# Altium footprint library MIE1W0505BGLVH3RP.PcbLib: 1 footprints
Each footprint in its own frame and in the unit in brackets; x right, y up, seen from the top. Pads: shape width x height; smd on the part's side, far side on the other; paste and mask are expansions set on the pad; w line width, h text height; cw(c..) or ccw(c..) is an arc to the next point about the centre after c.
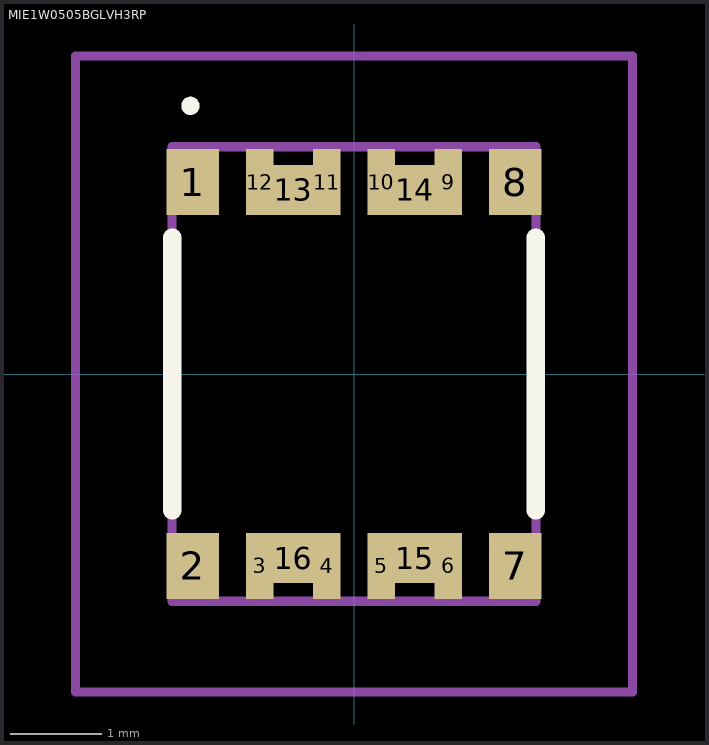
[diagram p0: the footprint, top view; thin cyan lines are the x and y axes]

## MIE1W0505BGLVH3RP [mm]
pads (16):
  rect 0.575x0.725 smd: 1(-1.775,2.112) 2(-1.775,-2.112) 7(1.775,-2.112) 8(1.775,2.112)
  rect 0.3x0.725 smd: 3(-1.038,-2.112) 4(-0.3,-2.112) 5(0.3,-2.112) 6(1.038,-2.112) 9(1.038,2.112) 10(0.3,2.112) 11(-0.299,2.112) 12(-1.038,2.112)
  rect 0.438x0.55 smd: 13(-0.668,2.025) 14(0.669,2.025) 15(0.669,-2.025) 16(-0.669,-2.025)
Top Overlay:
  lines w0.1: -1.8,2.9 -1.8,2.9 ; -1.8,2.9 ccw(c-1.8,2.95) -1.8,3 ; -1.8,2.9 cw(c-1.8,2.95) -1.8,3 ; -1.8,3 -1.8,3
  lines w0.2: -2,-1.5 -2,1.5 ; 2,-1.5 2,1.5
Mechanical 15:
  lines w0.1: -2,-2.5 2,-2.5 2,2.5 -2,2.5 -2,-2.5
Mechanical 20:
  lines w0.1: -3.063,-3.5 3.063,-3.5 3.063,3.5 -3.063,3.5 -3.063,-3.5